# Altium footprint library Ezlo.PcbLib: 103 footprints (part 2 of 7)
Each footprint in its own frame and in the unit in brackets; x right, y up, seen from the top. Pads: shape width x height; smd on the part's side, far side on the other; paste and mask are expansions set on the pad; w line width, h text height; cw(c..) or ccw(c..) is an arc to the next point about the centre after c.
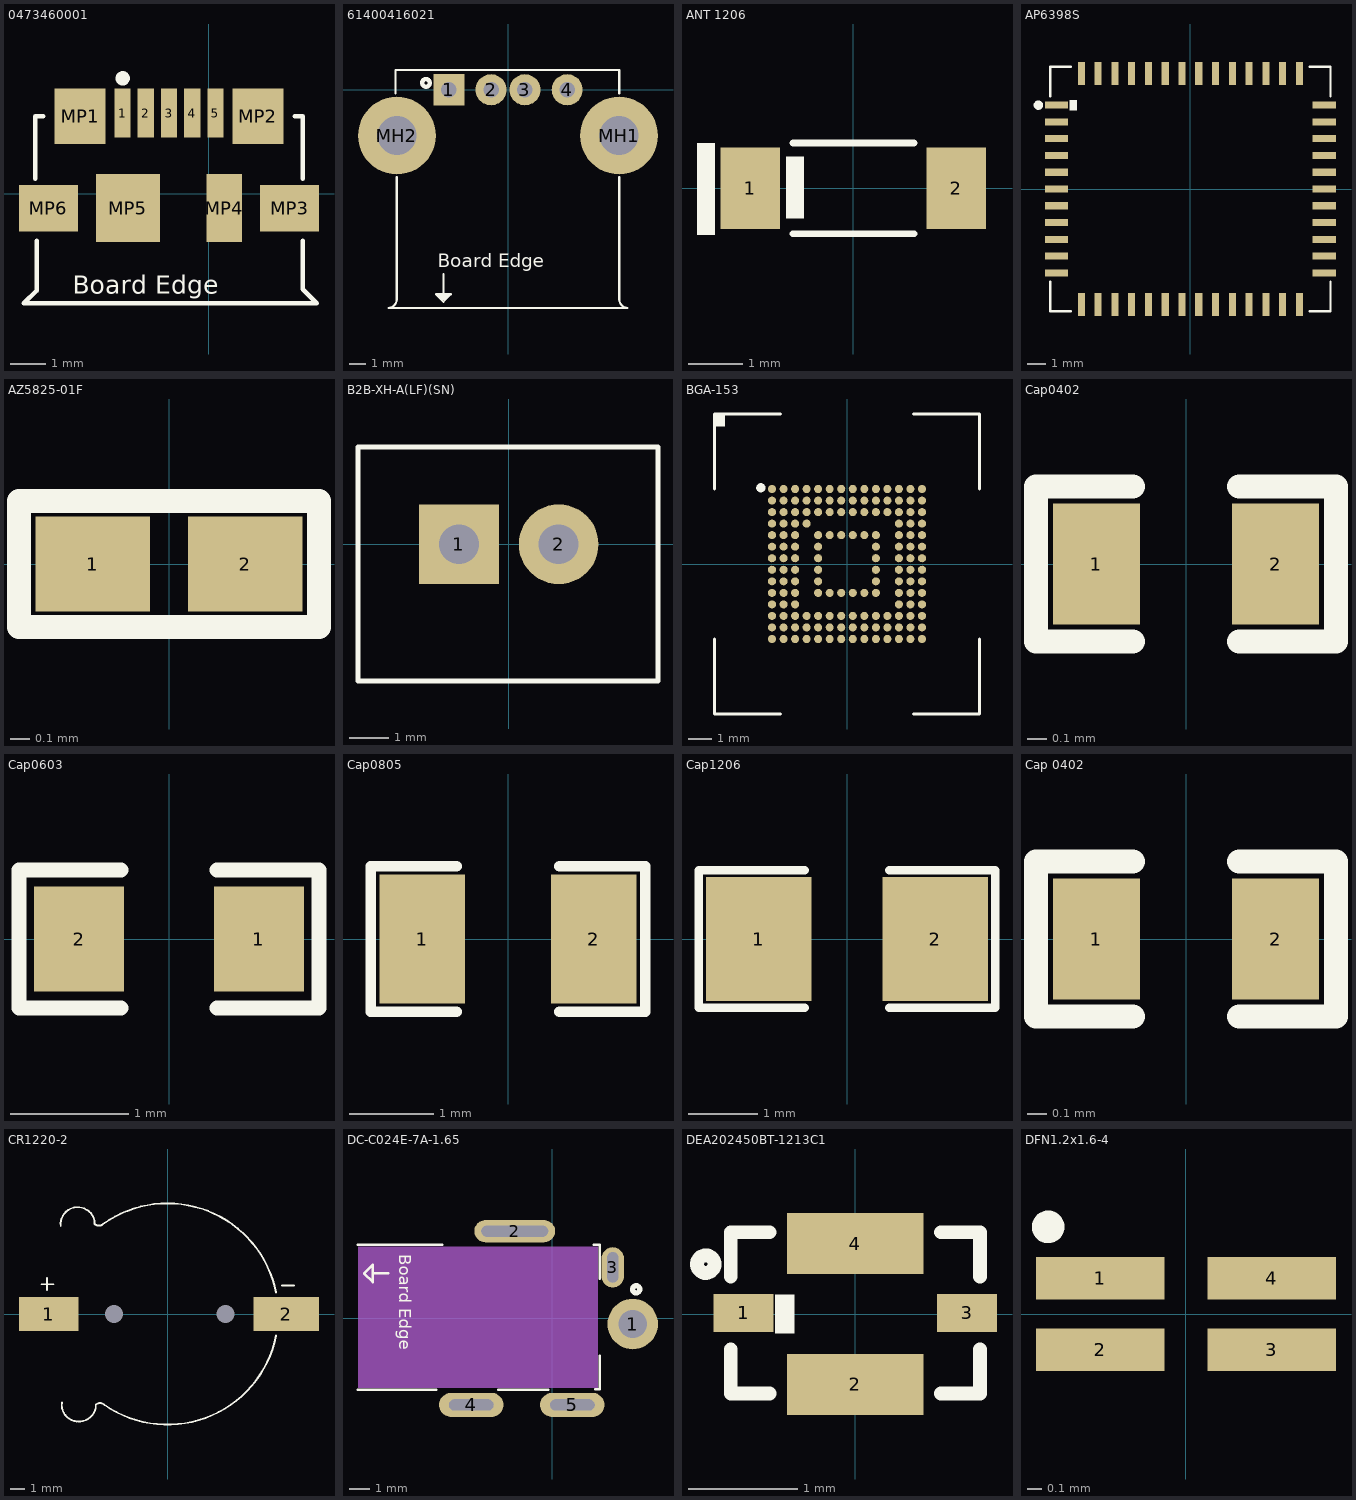
[diagram p1: the footprints below, top view; thin cyan lines are the x and y axes]

## 0473460001 [mm]
pads (11):
  rect 0.45x1.38 smd: 1(-2.418,2.254) 2(-1.768,2.254) 3(-1.118,2.254) 4(-0.468,2.254) 5(0.182,2.254)
  rect 1.425x1.55 smd: MP1(-3.605,2.169) MP2(1.37,2.169)
  rect 1.65x1.3 smd: MP3(2.257,-0.406) MP6(-4.493,-0.406)
  rect 1x1.9 smd: MP4(0.432,-0.406)
  rect 1.8x1.9 smd: MP5(-2.268,-0.406)
Top Overlay:
  circle w0.2: c-2.413,3.226 r0.102
  lines w0.127: -4.868,0.416 -4.868,2.134 ; -4.868,2.164 -4.638,2.164 ; -4.826,-1.327 -4.826,-2.327 -4.826,-2.718 -5.182,-3.073 3.023,-3.073 2.631,-2.682 2.631,-1.327 ; 2.402,2.164 2.632,2.164 ; 2.632,0.416 2.632,2.134
  text "Board Edge" at -3.81,-2.803 h0.51
3D body "step_temp.STEP": height 2.7, standoff -0.25, extent -5.298,-3.336 3.062,2.094

## 61400416021 [mm]
pads (6):
  rect 1.84x1.84 hole 0.92: 1(-3.5,0)
  round 1.84 hole 0.92: 2(-1,0) 3(1,0) 4(3.5,0)
  round 4.6 hole 2.3: MH1(6.57,-2.71) MH2(-6.57,-2.71)
Top Overlay:
  circle w0.254: c-4.851,0.406 r0.227
  rectangle: -3.962,-12.433 -3.658,-12.268
  rectangle: -4.115,-12.313 -3.531,-12.09
  lines w0.127: -6.655,-0.229 -6.655,1.168 6.528,1.168 ; -6.579,-5.156 -6.579,-12.344 cw(c-7.099,-12.383) -7.061,-12.903 7.061,-12.903 cw(c7.099,-12.383) 6.579,-12.344 6.579,-5.156 ; -3.81,-10.897 -3.81,-12.09 -4.267,-12.09 -3.823,-12.535 -3.378,-12.09 -3.785,-12.09 ; 6.579,-0.229 6.579,1.168
  text "Board Edge" at -4.14,-10.503 h0.8
3D body "61400416021_Download_STP_61400416021_rev1.stp": height 7.93, standoff -3.76, extent -8.048,-12.919 7.947,1.081

## ANT 1206 [mm]
pads (2):
  rect 1.1x1.5 smd: 1(-1.9,0) 2(1.9,0)
Top Overlay:
  rectangle: -1.245,-0.559 -0.914,0.584
  region: -2.555,0.838 -2.886,0.838 -2.886,-0.864 -2.555,-0.864
  lines w0.127: -1.118,-0.838 1.118,-0.838 ; -1.118,0.838 1.118,0.838
3D body "User Library-1206 SMD Capacitor.step": height 1, standoff 0, extent -1.599,-0.799 1.601,0.801

## AP6398S [mm]
pads (50):
  rect 1.25x0.38 smd: 1(-7.185,4.5) 2(-7.185,3.6) 3(-7.185,2.7) 4(-7.185,1.8) 5(-7.185,0.9) 6(-7.185,0) 7(-7.185,-0.9) 8(-7.185,-1.8) 9(-7.185,-2.7) 10(-7.185,-3.6) 11(-7.185,-4.5) 26(7.185,-4.5) 27(7.185,-3.6) 28(7.185,-2.7) 29(7.185,-1.8) 30(7.185,-0.9) 31(7.185,0) 32(7.185,0.9) 33(7.185,1.8) 34(7.185,2.7) 35(7.185,3.6) 36(7.185,4.5)
  rect 0.38x1.25 smd: 12(-5.85,-6.19) 13(-4.95,-6.19) 14(-4.05,-6.19) 15(-3.15,-6.19) 16(-2.25,-6.19) 17(-1.35,-6.19) 18(-0.45,-6.19) 19(0.45,-6.19) 20(1.35,-6.19) 21(2.25,-6.19) 22(3.15,-6.19) 23(4.05,-6.19) 24(4.95,-6.19) 25(5.85,-6.19) 37(5.85,6.19) 38(4.95,6.19) 39(4.05,6.19) 40(3.15,6.19) 41(2.25,6.19) 42(1.35,6.19) 43(0.45,6.19) 44(-0.45,6.19) 45(-1.35,6.19) 46(-2.25,6.19) 47(-3.15,6.19) 48(-4.05,6.19) 49(-4.95,6.19) 50(-5.85,6.19)
Top Overlay:
  circle w0.254: c-8.153,4.496 r0.127
  rectangle: -6.477,4.216 -6.071,4.775
  lines w0.127: -7.518,-4.978 -7.518,-6.553 -6.401,-6.553 ; -7.518,4.978 -7.518,6.553 -6.401,6.553 ; 6.401,-6.553 7.518,-6.553 7.518,-4.978 ; 6.401,6.553 7.518,6.553 7.518,4.978
3D body "User Library-AP6398S.step": height 1.8, standoff 0, extent -7.493,-6.498 7.507,6.502

## AZ5825-01F [mm] "DFN1006P ESD Protection Devices ROHS"
pads (2):
  rect 0.6x0.5 smd: 1(-0.4,0) 2(0.4,0)
Top Overlay:
  lines w0.127: -0.787,-0.33 -0.787,0.33 0.787,0.33 0.787,-0.33 -0.787,-0.33
3D body "User Library-DFN1006-2.STEP": height 0.48, standoff -0.02, extent -0.5,-0.3 0.5,0.3

## B2B-XH-A(LF)(SN) [mm]
pads (2):
  rect 2x2 hole 1: 1(-1.25,0)
  round 2 hole 1: 2(1.25,0)
Top Overlay:
  lines w0.127: -3.782,-3.432 -3.782,2.442 3.74,2.442 3.74,-3.432 -3.782,-3.432
3D body "B2B-XH-A(LF)(SN)--3DModel-STEP-56544.STEP": height 7, standoff -3.4, extent -3.718,-3.366 3.682,2.384

## BGA-153 [mm]
pads (153):
  round 0.35 smd: A1(-3.25,3.25) A2(-2.75,3.25) A3(-2.25,3.25) A4(-1.75,3.25) A5(-1.25,3.25) A6(-0.75,3.25) A7(-0.25,3.25) A8(0.25,3.25) A9(0.75,3.25) A10(1.25,3.25) A11(1.75,3.25) A12(2.25,3.25) A13(2.75,3.25) A14(3.25,3.25) B1(-3.25,2.75) B2(-2.75,2.75) B3(-2.25,2.75) B4(-1.75,2.75) B5(-1.25,2.75) B6(-0.75,2.75) B7(-0.25,2.75) B8(0.25,2.75) B9(0.75,2.75) B10(1.25,2.75) B11(1.75,2.75) B12(2.25,2.75) B13(2.75,2.75) B14(3.25,2.75) C1(-3.25,2.25) C2(-2.75,2.25) C3(-2.25,2.25) C4(-1.75,2.25) C5(-1.25,2.25) C6(-0.75,2.25) C7(-0.25,2.25) C8(0.25,2.25) C9(0.75,2.25) C10(1.25,2.25) C11(1.75,2.25) C12(2.25,2.25) C13(2.75,2.25) C14(3.25,2.25) D1(-3.25,1.75) D2(-2.75,1.75) D3(-2.25,1.75) D4(-1.75,1.75) D12(2.25,1.75) D13(2.75,1.75) D14(3.25,1.75) E1(-3.25,1.25) E2(-2.75,1.25) E3(-2.25,1.25) E5(-1.25,1.25) E6(-0.75,1.25) E7(-0.25,1.25) E8(0.25,1.25) E9(0.75,1.25) E10(1.25,1.25) E12(2.25,1.25) E13(2.75,1.25) E14(3.25,1.25) F1(-3.25,0.75) F2(-2.75,0.75) F3(-2.25,0.75) F5(-1.25,0.75) F10(1.25,0.75) F12(2.25,0.75) F13(2.75,0.75) F14(3.25,0.75) G1(-3.25,0.25) G2(-2.75,0.25) G3(-2.25,0.25) G5(-1.25,0.25) G10(1.25,0.25) G12(2.25,0.25) G13(2.75,0.25) G14(3.25,0.25) H1(-3.25,-0.25) H2(-2.75,-0.25) H3(-2.25,-0.25) H5(-1.25,-0.25) H10(1.25,-0.25) H12(2.25,-0.25) H13(2.75,-0.25) H14(3.25,-0.25) J1(-3.25,-0.75) J2(-2.75,-0.75) J3(-2.25,-0.75) J5(-1.25,-0.75) J10(1.25,-0.75) J12(2.25,-0.75) J13(2.75,-0.75) J14(3.25,-0.75) K1(-3.25,-1.25) K2(-2.75,-1.25) K3(-2.25,-1.25) K5(-1.25,-1.25) K6(-0.75,-1.25) K7(-0.25,-1.25) K8(0.25,-1.25) K9(0.75,-1.25) K10(1.25,-1.25) K12(2.25,-1.25) K13(2.75,-1.25) K14(3.25,-1.25) L1(-3.25,-1.75) L2(-2.75,-1.75) L3(-2.25,-1.75) L12(2.25,-1.75) L13(2.75,-1.75) L14(3.25,-1.75) M1(-3.25,-2.25) M2(-2.75,-2.25) M3(-2.25,-2.25) M4(-1.75,-2.25) M5(-1.25,-2.25) M6(-0.75,-2.25) M7(-0.25,-2.25) M8(0.25,-2.25) M9(0.75,-2.25) M10(1.25,-2.25) M11(1.75,-2.25) M12(2.25,-2.25) M13(2.75,-2.25) M14(3.25,-2.25) N1(-3.25,-2.75) N2(-2.75,-2.75) N3(-2.25,-2.75) N4(-1.75,-2.75) N5(-1.25,-2.75) N6(-0.75,-2.75) N7(-0.25,-2.75) N8(0.25,-2.75) N9(0.75,-2.75) N10(1.25,-2.75) N11(1.75,-2.75) N12(2.25,-2.75) N13(2.75,-2.75) N14(3.25,-2.75) P1(-3.25,-3.25) P2(-2.75,-3.25) P3(-2.25,-3.25) P4(-1.75,-3.25) P5(-1.25,-3.25) P6(-0.75,-3.25) P7(-0.25,-3.25) P8(0.25,-3.25) P9(0.75,-3.25) P10(1.25,-3.25) P11(1.75,-3.25) P12(2.25,-3.25) P13(2.75,-3.25) P14(3.25,-3.25)
Top Overlay:
  circle w0.2: c-3.734,3.302 r0.1
  rectangle: -5.75,5.969 -5.283,6.5
  lines w0.127: -5.75,-3.25 -5.75,-6.5 -2.875,-6.5 ; -5.75,3.25 -5.75,6.5 -2.875,6.5 ; 2.875,-6.5 5.75,-6.5 5.75,-3.25 ; 2.875,6.5 5.75,6.5 5.75,3.25
3D body "THGBMNG5D1LBAIL.stp": height 0.8, standoff 0, extent -5.75,-6.5 5.75,6.5

## Cap0402 [mil]
pads (2):
  rect 18x25 smd mask+2.36: 1(-18.5,0) 2(18.5,0)
Top Overlay:
  lines w5: -11,-16 -31,-16 -31,16 -11,16 ; 11,-16 31,-16 31,16 11,16
3D body "User Library-Capacitor 0402.step": height 18.5, standoff -1.18, extent -19.68,-9.84 19.7,9.85

## Cap0603 [mil]
pads (2):
  rect 30x35 smd: 1(30,0) 2(-30,0)
Top Overlay:
  lines w5: -16,-23 -50,-23 -50,23 -16,23 ; 16,-23 50,-23 50,23 16,23
3D body "User Library-CAPC1608X09.step": height 34.25, standoff -1.18, extent -31.49,-15.74 31.51,15.76

## Cap0805 [mil] "SMD 0805"
pads (2):
  rect 40x60 smd mask+2.76: 1(-40,0) 2(40,0)
Top Overlay:
  lines w5: -24,-34 -64,-34 -64,34 -24,34 ; 24,-34 64,-34 64,34 24,34
3D body "User Library-0805 SMD Capacitor.step": height 30, standoff -0.79, extent -39.36,-24.6 39.38,24.61

## Cap1206 [mil] "SMD 1206"
pads (2):
  rect 60x70 smd: 1(-50,0) 2(50,0)
Top Overlay:
  lines w5: -24,-39 -84,-39 -84,39 -24,39 ; 24,-39 84,-39 84,39 24,39
3D body "User Library-1206 SMD Capacitor.step": height 39.45, standoff 0, extent -62.96,-31.46 63.03,31.53

## Cap 0402 [mil]
pads (2):
  rect 18x25 smd mask+2.36: 1(-18.5,0) 2(18.5,0)
Top Overlay:
  lines w5: -11,-16 -31,-16 -31,16 -11,16 ; 11,-16 31,-16 31,16 11,16
3D body "User Library-Capacitor 0402.step": height 18.5, standoff -1.18, extent -19.68,-9.84 19.7,9.85

## CR1220-2 [mm]
pads (4):
  rect 4x2.3 smd: 1(-8,0)
  rect 4.4x2.3 smd: 2(8,0)
  round 0 hole 1.22 unplated: MH1(-3.6,0) MH2(3.9,0)
Top Overlay:
  lines w0.127: -8.502,2.007 -7.689,2.007 ; -8.121,1.6 -8.121,2.413 ; -7.188,5.918 cw(c-6.058,6.058) -6.198,7.188 ; -7.113,-5.971 ccw(c-5.983,-6.111) -6.123,-7.241 ; -6.299,7.163 cw(c-6.045,6.028) -4.91,6.282 -4.91,6.068 ccw(c-4.618,6.36) -4.326,6.068 ; -6.224,-7.215 ccw(c-5.97,-6.081) -4.835,-6.335 -4.835,-6.121 cw(c-4.543,-6.413) -4.251,-6.121 ; -4.325,6.066 cw(c0,0) 7.306,1.456 ; -4.25,-6.119 ccw(c0,0) 7.306,-1.456 ; 7.703,1.93 8.516,1.93
3D body "qj_cr1220-2.stp": height 4, standoff -0.5, extent -9.748,-7.45 9.952,7.45

## DC-C024E-7A-1.65 [mm]
pads (5):
  round 2.5 hole 1.4: 1(3.995,-0.3)
  oval 4x1.1 hole 0.55 slot 3.3 at 0 deg: 2(-1.845,4.3)
  oval 1.1x2 hole 0.55 slot 1.5 at 90 deg: 3(3.005,2.507)
  oval 3.2x1.2 hole 0.55 slot 2.2 at 0 deg: 4(-3.995,-4.3) 5(1.005,-4.3)
Top Overlay:
  circle w0.254: c4.166,1.422 r0.18
  lines w0.127: -9.601,-3.556 -5.74,-3.556 ; -9.601,3.632 -5.436,3.632 ; -8.103,2.21 -8.865,2.21 ; -2.667,-3.556 -0.178,-3.556 ; 2.057,3.632 2.353,3.632 2.353,1.947 ; 2.134,-3.531 2.362,-3.531 ; -8.865,2.21 -8.865,1.778 -9.296,2.21 -8.865,2.642 -8.865,2.21
  lines w0.128: 2.362,-3.531 2.362,-1.88
  text "Board Edge" at -7.565,3.162 h0.6
Mechanical 1:
  pour cut-out: 2.261,3.531 -9.601,3.531 -9.601,-3.454 2.261,-3.454
3D body "dc-c024e-7a-165.stp": height 5.05, standoff -0.75, extent -9.565,-4.48 4.435,4.521

## DEA202450BT-1213C1 [mm]
pads (4):
  rect 0.55x0.35 smd: 1(-1.025,0.01) 3(1.025,0.01)
  rect 1.25x0.56 smd: 2(0,-0.645) 4(0,0.645)
Top Overlay:
  circle w0.127: c-1.372,0.457 r0.08
  rectangle: -0.737,-0.178 -0.559,0.178
  lines w0.127: -1.143,-0.323 -1.143,-0.729 -0.787,-0.729 ; -1.143,0.343 -1.143,0.749 -0.787,0.749 ; 0.787,-0.729 1.143,-0.729 1.143,-0.323 ; 0.787,0.749 1.143,0.749 1.143,0.343
3D body "DEA-4_2P0X1P25.step": height 0.26, standoff 0, extent -1.08,-0.698 1.08,0.698

## DFN1.2x1.6-4 [mm]
pads (4):
  rect 0.9x0.3 smd: 1(-0.6,0.25) 2(-0.6,-0.25) 3(0.6,-0.25) 4(0.6,0.25)
Top Overlay:
  circle w0.127: c-0.965,0.61 r0.051
3D body "SY6283ADRC.STEP": height 0.55, standoff 0, extent -0.81,-0.6 0.81,0.6